# Altium footprint library 10uF electrolyte capacitor.PcbLib: 1 footprints
Each footprint in its own frame and in the unit in brackets; x right, y up, seen from the top. Pads: shape width x height; smd on the part's side, far side on the other; paste and mask are expansions set on the pad; w line width, h text height; cw(c..) or ccw(c..) is an arc to the next point about the centre after c.
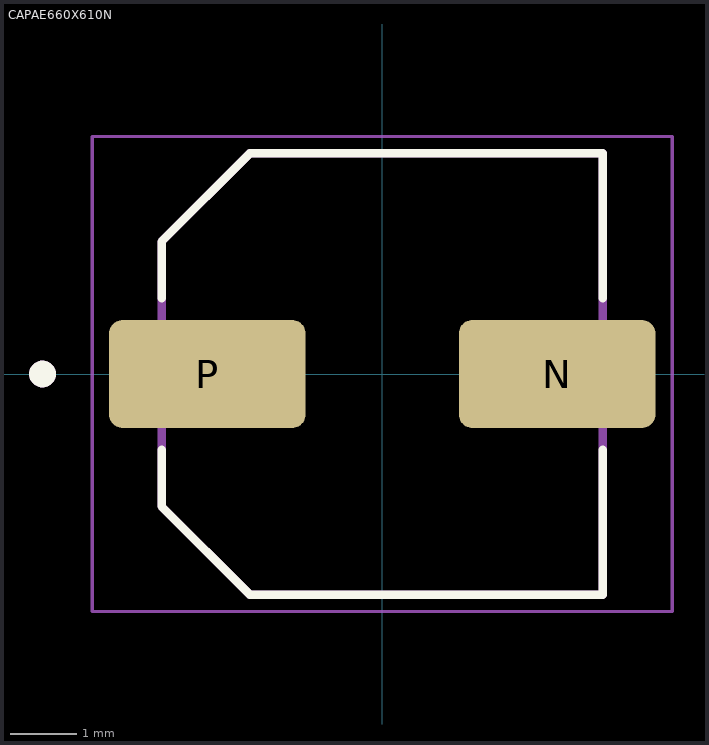
[diagram p0: the footprint, top view; thin cyan lines are the x and y axes]

## CAPAE660X610N [mm]
height 6.1
pads (2):
  rrect25% 2.94x1.62 smd: N(2.615,0) P(-2.615,0)
Top Overlay:
  circle w0.2: c-5.08,0 r0.1
  lines w0.127: -3.3,-1.13 -3.3,-1.98 -1.98,-3.3 3.3,-3.3 3.3,-1.13 ; -3.3,1.13 -3.3,1.98 -1.98,3.3 3.3,3.3 3.3,1.13
Assembly Top:
  circle w0.2: c-5.08,0 r0.1
  lines w0.127: -3.3,-1.98 -1.98,-3.3 3.3,-3.3 3.3,3.3 -1.98,3.3 -3.3,1.98 -3.3,-1.98
Courtyard Top:
  lines w0.05: -4.335,-3.55 -4.335,3.55 4.335,3.55 4.335,-3.55 -4.335,-3.55
3D body "step_temp.STEP": height 6.4, standoff 0, extent -3.5,-3.3 3.5,3.3